# Altium integrated library HTSW-101-07-S-D.IntLib: 1 symbol
Pins are listed as number, name and electrical type; pins without a type are passive.

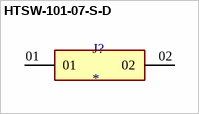
[diagram p0: symbol HTSW-101-07-S-D]

## HTSW-101-07-S-D
designator J?
MP: HTSW-101-07-S-D; Availability: Unavailable; Price: None; Package: None; Value: *
footprint SAMTEC_HTSW-101-07-S-D
pins: 01, 02